# Altium footprint library CONN_39773-0002_MOL.PcbLib: 1 footprints
Each footprint in its own frame and in the unit in brackets; x right, y up, seen from the top. Pads: shape width x height; smd on the part's side, far side on the other; paste and mask are expansions set on the pad; w line width, h text height; cw(c..) or ccw(c..) is an arc to the next point about the centre after c.
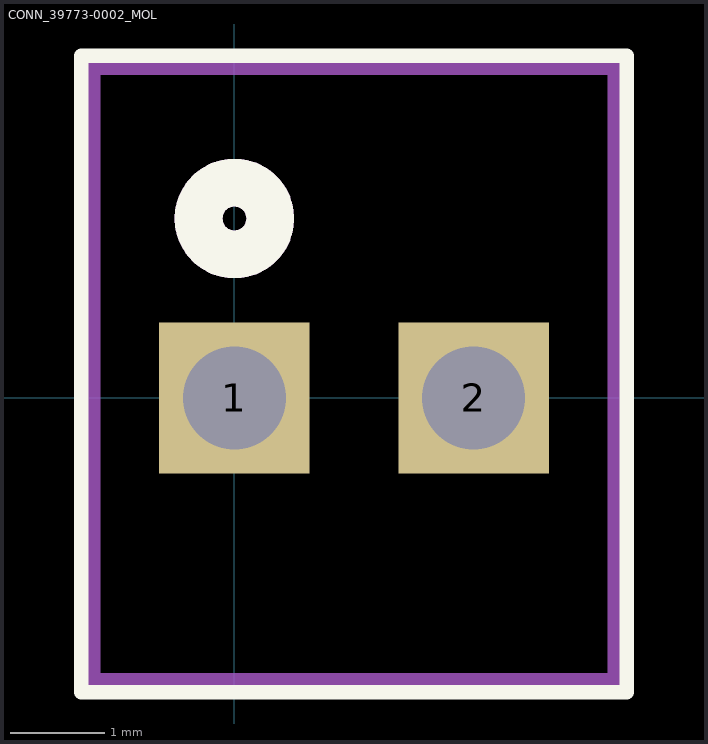
[diagram p0: the footprint, top view; thin cyan lines are the x and y axes]

## CONN_39773-0002_MOL [mil]
pads (2):
  rect 63x63 hole 43: 1(0,0) 2(100,0)
Top Overlay:
  lines w6: -64,-123 -64,143 164,143 164,-123 -64,-123
  lines w20: -15,75 cw(c0,75) 15,75 cw(c0,75) -15,75
Bottom Overlay:
  lines w20: -15,75 cw(c0,75) 15,75 cw(c0,75) -15,75
Assembly Top:
  lines w6: -59,-118 -59,138 159,138 159,-118 -59,-118
  lines w20: -15,75 cw(c0,75) 15,75 cw(c0,75) -15,75
3D body "397730002.stp": height 394, standoff -134, extent -59,-116 159,140